# Altium schematic symbol library 12A, fast-acting, 125V DC rating.SchLib: 1 symbol
Pins are listed as number, name and electrical type; pins without a type are passive.

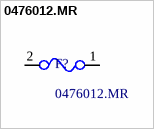
[diagram p0: symbol 0476012.MR]

## 0476012.MR
designator F?
12A, fast-acting, 125V DC rating; LSCS Part #: C3161783; Supplier 1: Newark; Supplier Part Number 1: 0476012.MR
footprint F_2410_Littelfuse_476 (Littelfuse 0476015.MRSN, 15A 125VDC Fuse, 2410 SMD, JLCPCB C3165851)
pins: 1, 2